# Altium integrated library EZPV60506MTS.IntLib: 1 symbol
Pins are listed as number, name and electrical type; pins without a type are passive.

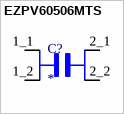
[diagram p0: symbol EZPV60506MTS]

## EZPV60506MTS
designator C?
CAP FILM 50UF 10% 600V RADIAL; MF: Panasonic; MP: EZPV60506MTS; SnapEDA_Link: https://www.snapeda.com/parts/EZPV60506MTS/Panasonic/view-part/?ref=snap; Check_prices: https://www.snapeda.com/parts/EZPV60506MTS/Panasonic/view-part/?ref=eda; Value: *; Digi-Key_Part_Number: 10-EZP-V60506MTS-ND; Package: MOLDED-4 Panasonic; Purchase-URL: https://pricing.snapeda.com/search/part/EZPV60506MTS/?ref=eda
footprint CAP_EZPV60506MTS
pins: 1_1 1, 1_2 1__1, 2_1 2, 2_2 2__1